# Altium footprint library ST-05 V1.1.PcbLib: 8 footprints
Each footprint in its own frame and in the unit in brackets; x right, y up, seen from the top. Pads: shape width x height; smd on the part's side, far side on the other; paste and mask are expansions set on the pad; w line width, h text height; cw(c..) or ccw(c..) is an arc to the next point about the centre after c.
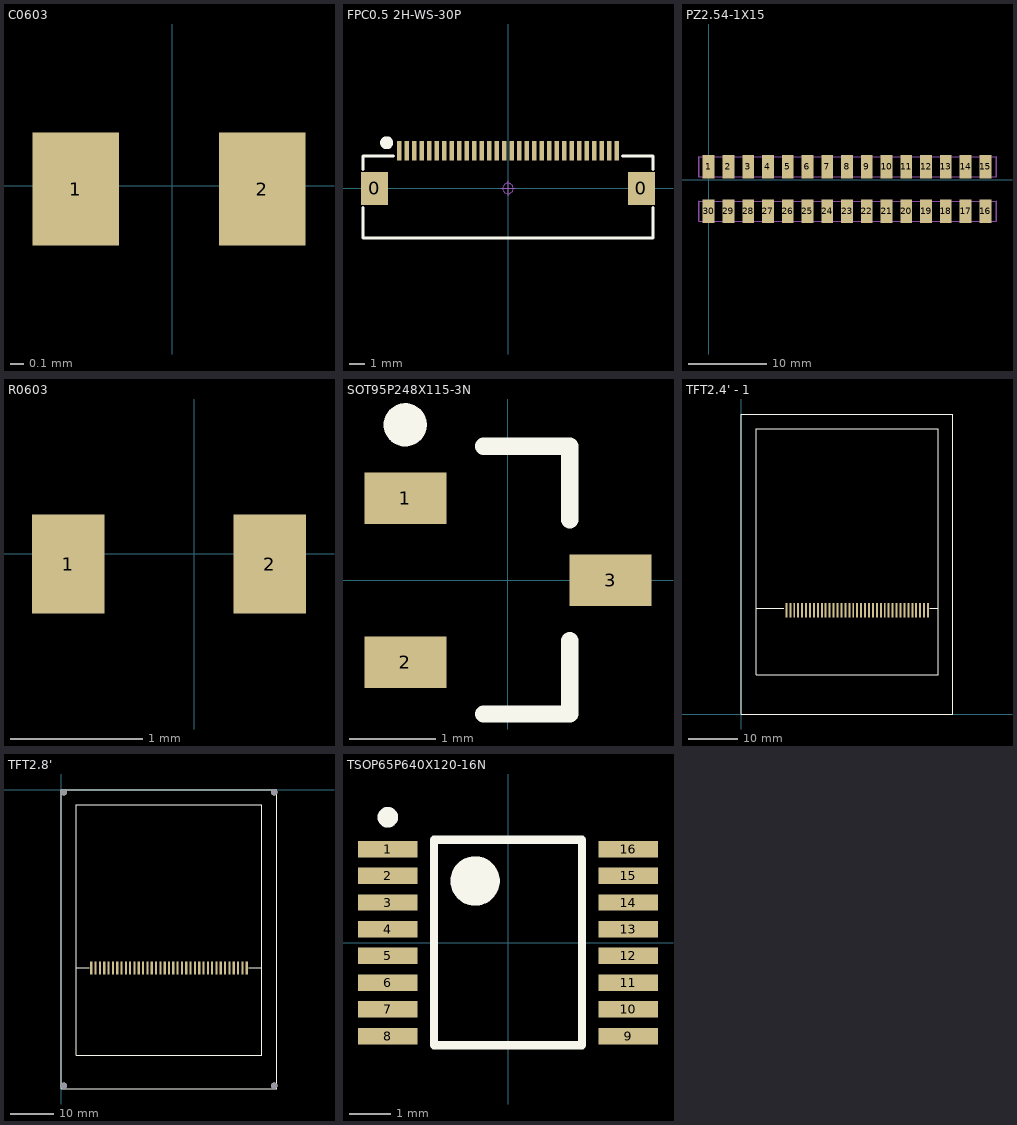
[diagram p0: the footprints below, top view; thin cyan lines are the x and y axes]

## C0603 [mm]
pads (2):
  rect 0.65x0.85 smd: 1(-0.725,-0.025) 2(0.675,-0.025)
3D body: height 0.45, standoff 0, extent -0.826,-0.425 0.774,0.375

## FPC0.5 2H-WS-30P [mm] "长：19.2mm，宽：5.2mm，高：2mm"
pads (32):
  rect 1.8x2.2 smd: 0(-8.9,0) 0(8.9,0)
  rect 0.3x1.3 smd: 1(7.25,2.497) 2(6.75,2.497) 3(6.25,2.497) 4(5.75,2.497) 5(5.25,2.497) 6(4.75,2.497) 7(4.25,2.497) 8(3.75,2.497) 9(3.25,2.497) 10(2.75,2.497) 11(2.25,2.497) 12(1.75,2.497) 13(1.25,2.497) 14(0.75,2.497) 15(0.25,2.497) 16(-0.25,2.497) 17(-0.75,2.497) 18(-1.25,2.497) 19(-1.75,2.497) 20(-2.25,2.497) 21(-2.75,2.497) 22(-3.25,2.497) 23(-3.75,2.497) 24(-4.25,2.497) 25(-4.75,2.497) 26(-5.25,2.497) 27(-5.75,2.497) 28(-6.25,2.497) 29(-6.75,2.497) 30(-7.25,2.497)
Top Overlay:
  circle w0.5: c-8.094,3.048 r0.18
  lines w0.2: -9.675,-1.27 -9.675,-3.302 9.675,-3.302 9.675,-1.27 ; -9.675,1.27 -9.675,2.159 -7.643,2.159 ; 7.643,2.159 9.675,2.159 9.675,1.27
Mechanical 15:
  circle w0.05: c0,0 r0.35
  lines w0.05: -0.5,0 0.5,0 ; 0,-0.5 0,0.5
3D body: height 2, standoff -0.01, extent -9.6,-3.15 9.6,2.85

## PZ2.54-1X15 [mil]
height 196.85
pads (30):
  rect 60x118.11 smd: 1(0,65) 2(100,65) 3(200,65) 4(300,65) 5(400,65) 6(500,65) 7(600,65) 8(700,65) 9(800,65) 10(900,65) 11(1000,65) 12(1100,65) 13(1200,65) 14(1300,65) 15(1400,65) 16(1400,-160) 17(1300,-160) 18(1200,-160) 19(1100,-160) 20(1000,-160) 21(900,-160) 22(800,-160) 23(700,-160) 24(600,-160) 25(500,-160) 26(400,-160) 27(300,-160) 28(200,-160) 29(100,-160) 30(0,-160)
Mechanical 1:
  lines w3.94: -49.98,-210 1455,-210 ; -49.99,-110 1455,-110 ; -49.98,15 1455,15 ; -49.99,115 1455,115
  lines w7.87: -49.99,-210 -49.99,-110 ; -49.99,15 -49.99,115 ; 1455,-210 1455,-110 ; 1455,15 1455,115
3D body: height 336.22, standoff -118.11, extent 1243,12 1943,112
3D body: height 336.22, standoff -118.11, extent 950,15 1650,115
3D body: height 336.22, standoff -118.11, extent -50,15 950,115

## R0603 [mm]
pads (2):
  rect 0.55x0.75 smd: 1(-0.954,-0.076) 2(0.573,-0.076)
3D body: height 0.5, standoff 0, extent -0.978,-0.476 0.622,0.324

## SOT95P248X115-3N [mm] "SOT23, 3-Leads, Body 2.95x2.48mm, Pitch 0.95mm, IPC Medium Density"
height 1.15
pads (3):
  rect 0.95x0.6 smd: 1(-1.19,0.95) 2(-1.19,-0.95) 3(1.19,0)
Top Overlay:
  circle w0.25: c-1.19,1.8 r0.125
  lines w0.2: -0.285,-1.55 0.715,-1.55 0.715,-0.7 ; -0.285,1.55 0.715,1.55 0.715,0.7
3D body: height 1.2, standoff 0, extent -1.262,-1.5 1.262,1.5

## TFT2.4' - 1 [mm]
pads (37):
  rect 0.4x3 smd: 1(9.173,21.082) 2(9.973,21.082) 3(10.773,21.082) 4(11.573,21.082) 5(12.373,21.082) 6(13.173,21.082) 7(13.973,21.082) 8(14.773,21.082) 9(15.573,21.082) 10(16.373,21.082) 11(17.173,21.082) 12(17.973,21.082) 13(18.773,21.082) 14(19.573,21.082) 15(20.373,21.082) 16(21.173,21.082) 17(21.973,21.082) 18(22.773,21.082) 19(23.573,21.082) 20(24.373,21.082) 21(25.173,21.082) 22(25.973,21.082) 23(26.773,21.082) 24(27.573,21.082) 25(28.373,21.082) 26(29.173,21.082) 27(29.973,21.082) 28(30.773,21.082) 29(31.573,21.082) 30(32.373,21.082) 31(33.173,21.082) 32(33.973,21.082) 33(34.773,21.082) 34(35.573,21.082) 35(36.373,21.082) 36(37.173,21.082) 37(37.973,21.082)
Top Overlay:
  lines w0.254: 3.175,21.463 8.636,21.463 ; 38.354,21.463 40.005,21.463 ; 0,0 0,61 43,61 43,0 0,0 ; 3.048,7.952 3.048,57.952 40.005,57.952 40.005,7.952 3.048,7.952

## TFT2.8' [mm]
pads (41):
  rect 0.5x3 smd: 1(7,-41.375) 2(8,-41.375) 3(9,-41.375) 4(10,-41.375) 5(11,-41.375) 6(12,-41.375) 7(13,-41.375) 8(14,-41.375) 9(15,-41.375) 10(16,-41.375) 11(17,-41.375) 12(18,-41.375) 13(19,-41.375) 14(20,-41.375) 15(21,-41.375) 16(22,-41.375) 17(23,-41.375) 18(24,-41.375) 19(25,-41.375) 20(26,-41.375) 21(27,-41.375) 22(28,-41.375) 23(29,-41.375) 24(30,-41.375) 25(31,-41.375) 26(32,-41.375) 27(33,-41.375) 28(34,-41.375) 29(35,-41.375) 30(36,-41.375) 31(37,-41.375) 32(38,-41.375) 33(39,-41.375) 34(40,-41.375) 35(41,-41.375) 36(42,-41.375) 37(43,-41.375)
  round 1.5 hole 1.5: 38(49.375,-0.625) 39(0.625,-0.625) 40(49.375,-68.625) 41(0.625,-68.625)
Top Overlay:
  lines w0.254: 3.5,-41.275 6.477,-41.275 ; 43.461,-41.275 46.5,-41.275 ; 0,-69.3 0,0 50,0 50,-69.3 0,-69.3 ; 3.5,-61.6 3.5,-3.5 46.5,-3.5 46.5,-61.6 3.5,-61.6

## TSOP65P640X120-16N [mm] "TSOP, 16-Leads, Body 5.00x4.40mm, Pitch 0.65mm, IPC Medium Density"
height 1.2
pads (16):
  rect 1.45x0.4 smd: 1(-2.925,2.275) 2(-2.925,1.625) 3(-2.925,0.975) 4(-2.925,0.325) 5(-2.925,-0.325) 6(-2.925,-0.975) 7(-2.925,-1.625) 8(-2.925,-2.275) 9(2.925,-2.275) 10(2.925,-1.625) 11(2.925,-0.975) 12(2.925,-0.325) 13(2.925,0.325) 14(2.925,0.975) 15(2.925,1.625) 16(2.925,2.275)
Top Overlay:
  circle w0.25: c-2.925,3.05 r0.125
  circle w0.6: c-0.8,1.5 r0.3
  lines w0.2: -1.8,-2.5 -1.8,2.5 1.8,2.5 1.8,-2.5 -1.8,-2.5
3D body: height 1.2, standoff 0, extent -3.2,-2.55 3.2,2.55